# Altium schematic symbol library CC0805JRNPOABN220.SchLib: 1 symbol
Pins are listed as number, name and electrical type; pins without a type are passive.

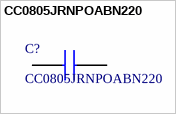
[diagram p0: symbol CC0805JRNPOABN220]

## CC0805JRNPOABN220
designator C?
22 pF ±5% 200V Ceramic Capacitor C0G, NP0 0805 (2012 Metric); Manufacturer_Name: Yageo; Copyright: Copyright (C) 2026 Ultra Librarian. All rights reserved.; Manufacturer_Part_Number: CC0805JRNPOABN220
footprint CAP_CC0805_YAG
pins: 1, 2